# Altium footprint library SOMs.PcbLib: 40 footprints (part 3 of 3)
Each footprint in its own frame and in the unit in brackets; x right, y up, seen from the top. Pads: shape width x height; smd on the part's side, far side on the other; paste and mask are expansions set on the pad; w line width, h text height; cw(c..) or ccw(c..) is an arc to the next point about the centre after c.
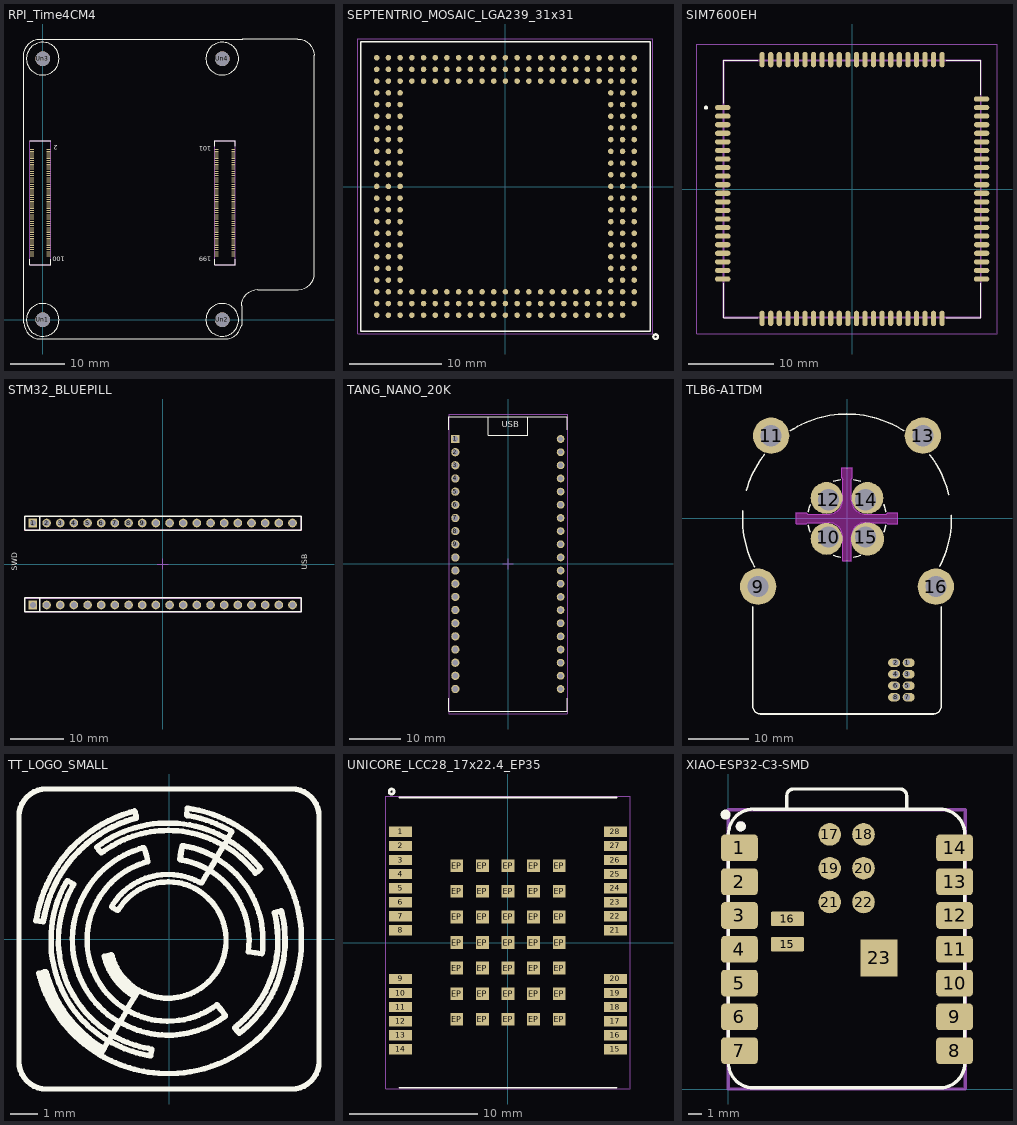
[diagram p2: the footprints below, top view; thin cyan lines are the x and y axes]

## RPI_Time4CM4 [mm] "2pcs. DF40HC(3.0)-100DS-0.4V"
pads (204):
  rect 0.7x0.2 smd: 1(-2,31.3) 2(1.08,31.3) 3(-2,30.9) 4(1.08,30.9) 5(-2,30.5) 6(1.08,30.5) 7(-2,30.1) 8(1.08,30.1) 9(-2,29.7) 10(1.08,29.7) 11(-2,29.3) 12(1.08,29.3) 13(-2,28.9) 14(1.08,28.9) 15(-2,28.5) 16(1.08,28.5) 17(-2,28.1) 18(1.08,28.1) 19(-2,27.7) 20(1.08,27.7) 21(-2,27.3) 22(1.08,27.3) 23(-2,26.9) 24(1.08,26.9) 25(-2,26.5) 26(1.08,26.5) 27(-2,26.1) 28(1.08,26.1) 29(-2,25.7) 30(1.08,25.7) 31(-2,25.3) 32(1.08,25.3) 33(-2,24.9) 34(1.08,24.9) 35(-2,24.5) 36(1.08,24.5) 37(-2,24.1) 38(1.08,24.1) 39(-2,23.7) 40(1.08,23.7) 41(-2,23.3) 42(1.08,23.3) 43(-2,22.9) 44(1.08,22.9) 45(-2,22.5) 46(1.08,22.5) 47(-2,22.1) 48(1.08,22.1) 49(-2,21.7) 50(1.08,21.7) 51(-2,21.3) 52(1.08,21.3) 53(-2,20.9) 54(1.08,20.9) 55(-2,20.5) 56(1.08,20.5) 57(-2,20.1) 58(1.08,20.1) 59(-2,19.7) 60(1.08,19.7) 61(-2,19.3) 62(1.08,19.3) 63(-2,18.9) 64(1.08,18.9) 65(-2,18.5) 66(1.08,18.5) 67(-2,18.1) 68(1.08,18.1) 69(-2,17.7) 70(1.08,17.7) 71(-2,17.3) 72(1.08,17.3) 73(-2,16.9) 74(1.08,16.9) 75(-2,16.5) 76(1.08,16.5) 77(-2,16.1) 78(1.08,16.1) 79(-2,15.7) 80(1.08,15.7) 81(-2,15.3) 82(1.08,15.3) 83(-2,14.9) 84(1.08,14.9) 85(-2,14.5) 86(1.08,14.5) 87(-2,14.1) 88(1.08,14.1) 89(-2,13.7) 90(1.08,13.7) 91(-2,13.3) 92(1.08,13.3) 93(-2,12.9) 94(1.08,12.9) 95(-2,12.5) 96(1.08,12.5) 97(-2,12.1) 98(1.08,12.1) 99(-2,11.7) 100(1.08,11.7) 101(31.92,31.3) 102(35,31.3) 103(31.92,30.9) 104(35,30.9) 105(31.92,30.5) 106(35,30.5) 107(31.92,30.1) 108(35,30.1) 109(31.92,29.7) 110(35,29.7) 111(31.92,29.3) 112(35,29.3) 113(31.92,28.9) 114(35,28.9) 115(31.92,28.5) 116(35,28.5) 117(31.92,28.1) 118(35,28.1) 119(31.92,27.7) 120(35,27.7) 121(31.92,27.3) 122(35,27.3) 123(31.92,26.9) 124(35,26.9) 125(31.92,26.5) 126(35,26.5) 127(31.92,26.1) 128(35,26.1) 129(31.92,25.7) 130(35,25.7) 131(31.92,25.3) 132(35,25.3) 133(31.92,24.9) 134(35,24.9) 135(31.92,24.5) 136(35,24.5) 137(31.92,24.1) 138(35,24.1) 139(31.92,23.7) 140(35,23.7) 141(31.92,23.3) 142(35,23.3) 143(31.92,22.9) 144(35,22.9) 145(31.92,22.5) 146(35,22.5) 147(31.92,22.1) 148(35,22.1) 149(31.92,21.7) 150(35,21.7) 151(31.92,21.3) 152(35,21.3) 153(31.92,20.9) 154(35,20.9) 155(31.92,20.5) 156(35,20.5) 157(31.92,20.1) 158(35,20.1) 159(31.92,19.7) 160(35,19.7) 161(31.92,19.3) 162(35,19.3) 163(31.92,18.9) 164(35,18.9) 165(31.92,18.5) 166(35,18.5) 167(31.92,18.1) 168(35,18.1) 169(31.92,17.7) 170(35,17.7) 171(31.92,17.3) 172(35,17.3) 173(31.92,16.9) 174(35,16.9) 175(31.92,16.5) 176(35,16.5) 177(31.92,16.1) 178(35,16.1) 179(31.92,15.7) 180(35,15.7) 181(31.92,15.3) 182(35,15.3) 183(31.92,14.9) 184(35,14.9) 185(31.92,14.5) 186(35,14.5) 187(31.92,14.1) 188(35,14.1) 189(31.92,13.7) 190(35,13.7) 191(31.92,13.3) 192(35,13.3) 193(31.92,12.9) 194(35,12.9) 195(31.92,12.5) 196(35,12.5) 197(31.92,12.1) 198(35,12.1) 199(31.92,11.7) 200(35,11.7)
  round 2.7 hole 2.7: Un1(0,0) Un2(33,0) Un3(0,48) Un4(33,48)
Top Overlay:
  circle w0.2: c0,48 r3
  circle w0.2: c33,48 r3
  circle w0.2: c0,0 r3
  circle w0.2: c33,0 r3
  lines w0.12: -2.35,11.1 -2.35,10.1 1.43,10.1 1.43,11.1 ; -2.35,32.9 1.43,32.9 ; 31.57,11.1 31.57,10.1 35.35,10.1 35.35,11.1 ; 31.57,31.9 31.57,32.9 35.35,32.9 35.35,31.9
  lines w0.2: -3.477,49.042 -3.246,49.801 -2.969,50.32 -2.596,50.774 -2.141,51.147 -1.623,51.425 -1.06,51.595 36.744,51.595 ; -3.475,49.042 -3.475,-0.525 -3.417,-1.111 -3.246,-1.673 -2.969,-2.192 -2.596,-2.647 -2.141,-3.02 -1.623,-3.297 -1.06,-3.468 -0.475,-3.525 33.525,-3.525 34.111,-3.468 34.673,-3.297 35.192,-3.02 35.647,-2.647 36.02,-2.192 36.394,-1.492 36.551,-0.975 36.549,2.577 ; 36.556,2.577 36.613,3.163 36.784,3.725 37.061,4.244 37.434,4.699 37.889,5.072 38.408,5.349 38.971,5.52 39.556,5.577 ; 36.703,51.618 46.827,51.618 ; 39.556,5.568 46.937,5.568 47.646,5.638 48.085,5.771 48.603,6.048 49.058,6.421 49.431,6.876 49.691,7.361 49.868,7.946 49.868,48.602 ; 46.886,51.602 47.471,51.545 48.034,51.374 48.553,51.097 49.007,50.723 49.38,50.269 49.657,49.75 49.828,49.187 49.886,48.602
  text "199" at 30.997,12 h1.5
  text "101" at 30.997,32.25 h1.5
  text "100" at 3.997,12 h1.5
  text "2" at 2.75,32.5 h1.5
Top Designator:
  lines w0.12: -2.35,10.1 1.43,10.1 1.43,32.9 -2.35,32.9 -2.35,10.1 ; 31.57,10.1 31.57,32.9 35.35,32.9 35.35,10.1 31.57,10.1
3D body "DF40HC(3.0)-100DS-0.4V.stp": height -0.38, standoff -3.28, extent 31.785,10.2 35.165,32.8
3D body "DF40HC(3.0)-100DS-0.4V.stp": height -0.38, standoff -3.28, extent -2.19,10.2 1.19,32.8
3D body "Time4CM4_Modular.step": height 7.87, standoff 2.01, extent -3.5,-3.643 49.86,51.5

## SEPTENTRIO_MOSAIC_LGA239_31x31 [mm] "Septentrio mosaic (mosaic-T/X5/H) LGA-239 31x31 mm, pitch 1.27, pad D0.6 NSMD, mask +0.075. Geometry per SparkFun GNSS mosaic-T (CC BY-SA 4.0), checked vs mosaic HW Manual v1.9."
height 4.17
pads (239):
  round 0.6 smd mask+0.075: A2(12.725,-13.945) A3(11.455,-13.945) A4(10.185,-13.945) A5(8.915,-13.945) A6(7.645,-13.945) A7(6.375,-13.945) A8(5.105,-13.945) A9(3.835,-13.945) A10(2.565,-13.945) A11(1.295,-13.945) A12(0.025,-13.945) A13(-1.245,-13.945) A14(-2.515,-13.945) A15(-3.785,-13.945) A16(-5.055,-13.945) A17(-6.325,-13.945) A18(-7.595,-13.945) A19(-8.865,-13.945) A20(-10.135,-13.945) A21(-11.405,-13.945) A22(-12.675,-13.945) A23(-13.945,-13.945) AA1(13.995,11.455) AA2(12.725,11.455) AA3(11.455,11.455) AA4(10.185,11.455) AA5(8.915,11.455) AA6(7.645,11.455) AA7(6.375,11.455) AA8(5.105,11.455) AA9(3.835,11.455) AA10(2.565,11.455) AA11(1.295,11.455) AA12(0.025,11.455) AA13(-1.245,11.455) AA14(-2.515,11.455) AA15(-3.785,11.455) AA16(-5.055,11.455) AA17(-6.325,11.455) AA18(-7.595,11.455) AA19(-8.865,11.455) AA20(-10.135,11.455) AA21(-11.405,11.455) AA22(-12.675,11.455) AA23(-13.945,11.455) AB1(13.995,12.725) AB2(12.725,12.725) AB3(11.455,12.725) AB4(10.185,12.725) AB5(8.915,12.725) AB6(7.645,12.725) AB7(6.375,12.725) AB8(5.105,12.725) AB9(3.835,12.725) AB10(2.565,12.725) AB11(1.295,12.725) AB12(0.025,12.725) AB13(-1.245,12.725) AB14(-2.515,12.725) AB15(-3.785,12.725) AB16(-5.055,12.725) AB17(-6.325,12.725) AB18(-7.595,12.725) AB19(-8.865,12.725) AB20(-10.135,12.725) AB21(-11.405,12.725) AB22(-12.675,12.725) AB23(-13.945,12.725) AC1(13.995,13.995) AC2(12.725,13.995) AC3(11.455,13.995) AC4(10.185,13.995) AC5(8.915,13.995) AC6(7.645,13.995) AC7(6.375,13.995) AC8(5.105,13.995) AC9(3.835,13.995) AC10(2.565,13.995) AC11(1.295,13.995) AC12(0.025,13.995) AC13(-1.245,13.995) AC14(-2.515,13.995) AC15(-3.785,13.995) AC16(-5.055,13.995) AC17(-6.325,13.995) AC18(-7.595,13.995) AC19(-8.865,13.995) AC20(-10.135,13.995) AC21(-11.405,13.995) AC22(-12.675,13.995) AC23(-13.945,13.995) B1(13.995,-12.675) B2(12.725,-12.675) B3(11.455,-12.675) B4(10.185,-12.675) B5(8.915,-12.675) B6(7.645,-12.675) B7(6.375,-12.675) B8(5.105,-12.675) B9(3.835,-12.675) B10(2.565,-12.675) B11(1.295,-12.675) B12(0.025,-12.675) B13(-1.245,-12.675) B14(-2.515,-12.675) B15(-3.785,-12.675) B16(-5.055,-12.675) B17(-6.325,-12.675) B18(-7.595,-12.675) B19(-8.865,-12.675) B20(-10.135,-12.675) B21(-11.405,-12.675) B22(-12.675,-12.675) B23(-13.945,-12.675) C1(13.995,-11.405) C2(12.725,-11.405) C3(11.455,-11.405) C4(10.185,-11.405) C5(8.915,-11.405) C6(7.645,-11.405) C7(6.375,-11.405) C8(5.105,-11.405) C9(3.835,-11.405) C10(2.565,-11.405) C11(1.295,-11.405) C12(0.025,-11.405) C13(-1.245,-11.405) C14(-2.515,-11.405) C15(-3.785,-11.405) C16(-5.055,-11.405) C17(-6.325,-11.405) C18(-7.595,-11.405) C19(-8.865,-11.405) C20(-10.135,-11.405) C21(-11.405,-11.405) C22(-12.675,-11.405) C23(-13.945,-11.405) D1(13.995,-10.135) D2(12.725,-10.135) D3(11.455,-10.135) D21(-11.405,-10.135) D22(-12.675,-10.135) D23(-13.945,-10.135) E1(13.995,-8.865) E2(12.725,-8.865) E3(11.455,-8.865) E21(-11.405,-8.865) E22(-12.675,-8.865) E23(-13.945,-8.865) F1(13.995,-7.595) F2(12.725,-7.595) F3(11.455,-7.595) F21(-11.405,-7.595) F22(-12.675,-7.595) F23(-13.945,-7.595) G1(13.995,-6.325) G2(12.725,-6.325) G3(11.455,-6.325) G21(-11.405,-6.325) G22(-12.675,-6.325) G23(-13.945,-6.325) H1(13.995,-5.055) H2(12.725,-5.055) H3(11.455,-5.055) H21(-11.405,-5.055) H22(-12.675,-5.055) H23(-13.945,-5.055) J1(13.995,-3.785) J2(12.725,-3.785) J3(11.455,-3.785) J21(-11.405,-3.785) J22(-12.675,-3.785) J23(-13.945,-3.785) K1(13.995,-2.515) K2(12.725,-2.515) K3(11.455,-2.515) K21(-11.405,-2.515) K22(-12.675,-2.515) K23(-13.945,-2.515) L1(13.995,-1.245) L2(12.725,-1.245) L3(11.455,-1.245) L21(-11.405,-1.245) L22(-12.675,-1.245) L23(-13.945,-1.245) M1(13.995,0.025) M2(12.725,0.025) M3(11.455,0.025) M21(-11.405,0.025) M22(-12.675,0.025) M23(-13.945,0.025) N1(13.995,1.295) N2(12.725,1.295) N3(11.455,1.295) N21(-11.405,1.295) N22(-12.675,1.295) N23(-13.945,1.295) P1(13.995,2.565) P2(12.725,2.565) P3(11.455,2.565) P21(-11.405,2.565) P22(-12.675,2.565) P23(-13.945,2.565) R1(13.995,3.835) R2(12.725,3.835) R3(11.455,3.835) R21(-11.405,3.835) R22(-12.675,3.835) R23(-13.945,3.835) T1(13.995,5.105) T2(12.725,5.105) T3(11.455,5.105) T21(-11.405,5.105) T22(-12.675,5.105) T23(-13.945,5.105) U1(13.995,6.375) U2(12.725,6.375) U3(11.455,6.375) U21(-11.405,6.375) U22(-12.675,6.375) U23(-13.945,6.375) V1(13.995,7.645) V2(12.725,7.645) V3(11.455,7.645) V21(-11.405,7.645) V22(-12.675,7.645) V23(-13.945,7.645) W1(13.995,8.915) W2(12.725,8.915) W3(11.455,8.915) W21(-11.405,8.915) W22(-12.675,8.915) W23(-13.945,8.915) Y1(13.995,10.185) Y2(12.725,10.185) Y3(11.455,10.185) Y21(-11.405,10.185) Y22(-12.675,10.185) Y23(-13.945,10.185)
Top Overlay:
  circle w0.25: c16.325,-16.275 r0.25
  lines w0.15: -15.675,-15.675 -15.675,15.725 15.725,15.725 15.725,-15.675 -15.675,-15.675
Mechanical 15:
  lines w0.05: -15.975,-15.975 -15.975,16.025 16.025,16.025 16.025,-15.975 -15.975,-15.975

## SIM7600EH [mm]
pads (87):
  rrect100% 1.8x0.6 smd: 1(-15.1,9.5) 2(-15.1,8.5) 3(-15.1,7.5) 4(-15.1,6.5) 5(-15.1,5.5) 6(-15.1,4.5) 7(-15.1,3.5) 8(-15.1,2.5) 9(-15.1,1.5) 10(-15.1,0.5) 11(-15.1,-0.5) 12(-15.1,-1.5) 13(-15.1,-2.5) 14(-15.1,-3.5) 15(-15.1,-4.5) 16(-15.1,-5.5) 17(-15.1,-6.5) 18(-15.1,-7.5) 19(-15.1,-8.5) 20(-15.1,-9.5) 41(15.1,-9.5) 42(15.1,-8.5) 43(15.1,-7.5) 44(15.1,-6.5) 45(15.1,-5.5) 46(15.1,-4.5) 47(15.1,-3.5) 48(15.1,-2.5) 49(15.1,-1.5) 50(15.1,-0.5) 51(15.1,0.5) 52(15.1,1.5) 53(15.1,2.5) 54(15.1,3.5) 55(15.1,4.5) 56(15.1,5.5) 57(15.1,6.5) 58(15.1,7.5) 59(15.1,8.5) 60(15.1,9.5) 81(-15.1,-10.5) 82(15.1,-10.5) 85(15.1,10.5)
  rrect100% 0.6x1.8 smd: 21(-9.5,-15.1) 22(-8.5,-15.1) 23(-7.5,-15.1) 24(-6.5,-15.1) 25(-5.5,-15.1) 26(-4.5,-15.1) 27(-3.5,-15.1) 28(-2.5,-15.1) 29(-1.5,-15.1) 30(-0.5,-15.1) 31(0.5,-15.1) 32(1.5,-15.1) 33(2.5,-15.1) 34(3.5,-15.1) 35(4.5,-15.1) 36(5.5,-15.1) 37(6.5,-15.1) 38(7.5,-15.1) 39(8.5,-15.1) 40(9.5,-15.1) 61(9.5,15.1) 62(8.5,15.1) 63(7.5,15.1) 64(6.5,15.1) 65(5.5,15.1) 66(4.5,15.1) 67(3.5,15.1) 68(2.5,15.1) 69(1.5,15.1) 70(0.5,15.1) 71(-0.5,15.1) 72(-1.5,15.1) 73(-2.5,15.1) 74(-3.5,15.1) 75(-4.5,15.1) 76(-5.5,15.1) 77(-6.5,15.1) 78(-7.5,15.1) 79(-8.5,15.1) 80(-9.5,15.1) 83(10.5,-15.1) 84(-10.5,-15.1) 86(-10.5,15.1) 87(10.5,15.1)
Top Overlay:
  lines w0.1: -15,-11 -15,-15 -11,-15 ; -15,10 -15,15 -11,15 ; 11,-15 15,-15 15,-11 ; 11,15 15,15 15,11
  lines w0.4: -17.1,9.5 ccw(c-17.05,9.5) -17,9.5 ccw(c-17.05,9.5) -17.1,9.5
Mechanical 13:
  lines w0.2: -15,-15 -15,15 15,15 15,-15 -15,-15
Mechanical 15:
  lines w0.1: -18.1,-16.9 -18.1,16.9 16.9,16.9 16.9,-16.9 -18.1,-16.9
3D body "SIM7600EH.stp": height 2.92, standoff 0.02, extent -15,-15 15,15

## STM32_BLUEPILL [mm]
pads (40):
  rect 1.6x1.6 hole 1.1: 1(-24.13,7.62) 40(-24.13,-7.62)
  round 1.6 hole 1.1: 2(-21.59,7.62) 3(-19.05,7.62) 4(-16.51,7.62) 5(-13.97,7.62) 6(-11.43,7.62) 7(-8.89,7.62) 8(-6.35,7.62) 9(-3.81,7.62) 10(-1.27,7.62) 11(1.27,7.62) 12(3.81,7.62) 13(6.35,7.62) 14(8.89,7.62) 15(11.43,7.62) 16(13.97,7.62) 17(16.51,7.62) 18(19.05,7.62) 19(21.59,7.62) 20(24.13,7.62) 21(24.13,-7.62) 22(21.59,-7.62) 23(19.05,-7.62) 24(16.51,-7.62) 25(13.97,-7.62) 26(11.43,-7.62) 27(8.89,-7.62) 28(6.35,-7.62) 29(3.81,-7.62) 30(1.27,-7.62) 31(-1.27,-7.62) 32(-3.81,-7.62) 33(-6.35,-7.62) 34(-8.89,-7.62) 35(-11.43,-7.62) 36(-13.97,-7.62) 37(-16.51,-7.62) 38(-19.05,-7.62) 39(-21.59,-7.62)
Top Overlay:
  lines w0.25: -22.86,-8.89 -22.86,-6.444 ; -22.86,6.35 -22.86,8.796 ; -25.68,-8.92 -25.68,-6.32 25.78,-6.32 25.78,-8.92 -25.68,-8.92 ; -25.68,6.32 -25.68,8.92 25.78,8.92 25.78,6.32 -25.68,6.32
  text "USB" at 27.257,-1.049 h1.8
  text "SWD" at -26.718,-1.258 h1.8
Mechanical 13:
  lines w0.1: -22.86,-8.89 -22.86,-6.35 ; -22.86,6.35 -22.86,8.89 ; 0,-6.35 -25.4,-6.35 -25.4,-6.32 0,-6.32 ; -25.4,8.89 0,8.89 0,8.92 -25.4,8.92 -25.4,8.89
Mechanical 15:
  lines w0.1: -1,0 1,0 ; 0,-1 0,1 ; -25.68,-8.89 25.78,-8.89 25.78,-6.35 -25.68,-6.35 -25.68,-8.89 ; -25.68,6.35 25.78,6.35 25.78,8.89 -25.68,8.89 -25.68,6.35
3D body "Blue Pill STM32.step": height 22, standoff 1.9, extent -31.115,-11.43 27.305,11.43
3D body "PBS-20.STEP": height 8.5, standoff -3.15, extent -25.4,-8.89 25.4,-6.35
3D body "PBS-20.STEP": height 8.5, standoff -3.15, extent -25.4,6.35 25.4,8.89

## TANG_NANO_20K [mm]
pads (40):
  rect 1.6x1.6 hole 1.1: 1(-10.16,24.13)
  round 1.6 hole 1.1: 2(-10.16,21.59) 3(-10.16,19.05) 4(-10.16,16.51) 5(-10.16,13.97) 6(-10.16,11.43) 7(-10.16,8.89) 8(-10.16,6.35) 9(-10.16,3.81) 10(-10.16,1.27) 11(-10.16,-1.27) 12(-10.16,-3.81) 13(-10.16,-6.35) 14(-10.16,-8.89) 15(-10.16,-11.43) 16(-10.16,-13.97) 17(-10.16,-16.51) 18(-10.16,-19.05) 19(-10.16,-21.59) 20(-10.16,-24.13)
  round 1.5 hole 1: 21(10.16,-24.13) 22(10.16,-21.59) 23(10.16,-19.05) 24(10.16,-16.51) 25(10.16,-13.97) 26(10.16,-11.43) 27(10.16,-8.89) 28(10.16,-6.35) 29(10.16,-3.81) 30(10.16,-1.27) 31(10.16,1.27) 32(10.16,3.81) 33(10.16,6.35) 34(10.16,8.89) 35(10.16,11.43) 36(10.16,13.97) 37(10.16,16.51) 38(10.16,19.05) 39(10.16,21.59) 40(10.16,24.13)
Top Overlay:
  lines w0.2: -11.43,-25.908 -11.43,-28.448 11.43,-28.448 11.43,-25.908 ; -11.43,25.908 -11.43,28.448 11.43,28.448 11.43,25.908 ; -3.81,28.448 -3.81,24.892 3.81,24.892 3.81,28.448
  text "USB" at -1.18,26.013 h2
Top Assembly:
  lines w0.1: -11.43,-28.956 -11.43,28.956 11.43,28.956 11.43,-28.956 -11.43,-28.956
Mechanical 15:
  lines w0.1: -1,0 1,0 ; 0,-1 0,1
3D body "Tang_Nano_20K_3921.step": height 19.17, standoff 2.41, extent -11.43,-29.518 11.43,28.502
3D body "User Library-PBS_(DS1023)_1line_connectors_h=5_0_8_5mm_step_2_54mm-1.step": height 8.5, standoff -3, extent -11.43,-10.406 -8.93,25.654
3D body "User Library-PBS_(DS1023)_1line_connectors_h=5_0_8_5mm_step_2_54mm-1.step": height 8.5, standoff -3, extent 8.93,-25.4 11.43,10.66

## TLB6-A1TDM [mm]
pads (16):
  oval 2x1.4 hole 1 copper offset 0.25,0 mask+0: 1(9.937,-23.829) 3(9.937,-25.729) 5(9.937,-27.629) 7(9.937,-29.529)
  oval 2x1.4 hole 1 copper offset -0.25,0 mask+0: 2(8.037,-23.829) 4(8.037,-25.729) 6(8.037,-27.629) 8(8.037,-29.529)
  round 6 hole 3.5 mask+0: 9(-14.68,-11.259) 11(-12.53,13.67) 13(12.53,13.67) 16(14.679,-11.259)
  round 5.25 hole 3.5 copper offset -0.3,-0.3 mask+0: 10(-3.08,-3.08)
  round 5.25 hole 3.5 copper offset -0.3,0.3 mask+0: 12(-3.08,3.08)
  round 5.25 hole 3.5 copper offset 0.3,0.3 mask+0: 14(3.08,3.08)
  round 5.5 hole 3.5 copper offset 0.3,-0.3 mask+0: 15(3.08,-3.08)
Top Overlay:
  lines w0.254: -17.201,1.301 ccw(c0,0) -15.279,-8.006 ; -16.615,4.638 cw(c0,0) -13.638,10.564 ; -15.55,-14.562 -15.55,-31.05 ccw(c-14.3,-31.05) -14.3,-32.3 14.3,-32.3 ccw(c14.3,-31.05) 15.55,-31.05 15.55,-14.562 ; -9.394,14.468 cw(c0,0) 9.378,14.479 ; -6.4,-1.134 ccw(c0,0) -6.108,-2.223 ; -6.4,1.134 cw(c0,0) -6.108,2.223 ; -2.223,-6.108 ccw(c0,0) -1.129,-6.401 ; -2.223,6.108 cw(c0,0) -1.134,6.4 ; 1.129,-6.401 ccw(c0,0) 2.223,-6.108 ; 1.134,6.4 cw(c0,0) 2.223,6.108 ; 6.108,-2.223 ccw(c0,0) 6.4,-1.134 ; 6.108,2.223 cw(c0,0) 6.4,1.134 ; 13.69,10.495 cw(c0,0) 16.803,3.901 ; 15.354,-7.863 ccw(c0,0) 17.241,0.565
Keep-Out Layer:
  board cut-out: -6.5,-0.7 -3.1,-0.7 -2.865,-0.712 -2.403,-0.803 -1.969,-0.983 -1.577,-1.245 -1.245,-1.577 -0.983,-1.969 -0.803,-2.403 -0.712,-2.865 -0.7,-3.1 -0.7,-6.5 0.7,-6.5 0.7,-3.1 0.712,-2.865 0.803,-2.403 0.983,-1.969 1.245,-1.577 1.577,-1.245 1.969,-0.983 2.403,-0.803 2.865,-0.712 3.1,-0.7 6.5,-0.7 6.5,0.7 3.1,0.7 2.865,0.712 2.403,0.803 1.969,0.983 1.577,1.245 1.245,1.577 0.983,1.969 0.803,2.403 0.712,2.865 0.7,3.1 0.7,6.5 -0.7,6.5 -0.7,3.1 -0.712,2.865 -0.803,2.403 -0.983,1.969 -1.245,1.577 -1.577,1.245 -1.969,0.983 -2.403,0.803 -2.865,0.712 -3.1,0.7 -6.5,0.7
  board cut-out: -8.4,-0.9 -6.7,-0.9 -6.5,-0.7 -3.1,-0.7 -2.865,-0.712 -2.403,-0.803 -1.969,-0.983 -1.577,-1.245 -1.245,-1.577 -0.983,-1.969 -0.803,-2.403 -0.712,-2.865 -0.7,-3.1 -0.7,-7 0.7,-7 0.7,-3.1 0.712,-2.865 0.803,-2.403 0.983,-1.969 1.245,-1.577 1.577,-1.245 1.969,-0.983 2.403,-0.803 2.865,-0.712 3.1,-0.7 6.5,-0.7 6.7,-0.9 8.4,-0.9 8.4,0.9 6.7,0.9 6.5,0.7 3.1,0.7 2.865,0.712 2.403,0.803 1.969,0.983 1.577,1.245 1.245,1.577 0.983,1.969 0.803,2.403 0.712,2.865 0.7,3.1 0.7,6.5 0.9,6.7 0.9,8.4 -0.9,8.4 -0.9,6.7 -0.7,6.5 -0.7,3.1 -0.712,2.865 -0.803,2.403 -0.983,1.969 -1.245,1.577 -1.577,1.245 -1.969,0.983 -2.403,0.803 -2.865,0.712 -3.1,0.7 -6.5,0.7 -6.7,0.9 -8.4,0.9
Keep-Out Layer:
  lines w0.1: -8.4,-0.9 -6.7,-0.9 -6.5,-0.7 -3.1,-0.7 cw(c-3.1,-3.1) -0.7,-3.1 -0.7,-7 0.7,-7 0.7,-3.1 cw(c3.1,-3.1) 3.1,-0.7 6.5,-0.7 6.7,-0.9 8.4,-0.9 8.4,0.9 6.7,0.9 6.5,0.7 3.1,0.7 cw(c3.1,3.1) 0.7,3.1 0.7,6.5 0.9,6.7 0.9,8.4 -0.9,8.4 -0.9,6.7 -0.7,6.5 -0.7,3.1 cw(c-3.1,3.1) -3.1,0.7 -6.5,0.7 -6.7,0.9 -8.4,0.9 -8.4,-0.9
Bottom Assembly:
  circle w0.127: c9.939,-29.54 r0.35
  circle w0.127: c9.939,-27.64 r0.35
  circle w0.127: c9.938,-27.628 r0.25
  circle w0.127: c9.939,-29.528 r0.25
  circle w0.127: c9.938,-27.628 r0.05
  circle w0.127: c9.939,-29.528 r0.05
  circle w0.127: c9.939,-25.74 r0.35
  circle w0.127: c9.939,-23.84 r0.35
  circle w0.127: c9.935,-23.828 r0.25
  circle w0.127: c9.936,-25.728 r0.25
  circle w0.127: c9.935,-23.828 r0.05
  circle w0.127: c9.936,-25.728 r0.05
  circle w0.127: c8.039,-29.54 r0.35
  circle w0.127: c8.039,-27.64 r0.35
  circle w0.127: c8.038,-27.63 r0.25
  circle w0.127: c8.039,-29.53 r0.25
  circle w0.127: c8.038,-27.63 r0.05
  circle w0.127: c8.039,-29.53 r0.05
  circle w0.127: c8.039,-25.74 r0.35
  circle w0.127: c8.039,-23.84 r0.35
  circle w0.127: c8.036,-25.729 r0.25
  circle w0.127: c8.035,-23.829 r0.25
  circle w0.127: c8.036,-25.729 r0.05
  circle w0.127: c8.035,-23.829 r0.05
  lines w0.127: -15.55,-13.678 cw(c-14.68,-11.26) -14.896,-8.699 ; -13.142,11.174 cw(c-12.53,13.67) -9.99,14.063 ; 9.99,14.063 cw(c12.53,13.67) 13.142,11.174 ; 14.896,-8.699 cw(c14.68,-11.26) 15.55,-13.678
Dimensions:
  lines w0.1: -8.4,-0.9 -6.7,-0.9 -6.5,-0.7 -3.1,-0.7 cw(c-3.1,-3.1) -0.7,-3.1 -0.7,-7 0.7,-7 0.7,-3.1 cw(c3.1,-3.1) 3.1,-0.7 6.5,-0.7 6.7,-0.9 8.4,-0.9 8.4,0.9 6.7,0.9 6.5,0.7 3.1,0.7 cw(c3.1,3.1) 0.7,3.1 0.7,6.5 0.9,6.7 0.9,8.4 -0.9,8.4 -0.9,6.7 -0.7,6.5 -0.7,3.1 cw(c-3.1,3.1) -3.1,0.7 -6.5,0.7 -6.7,0.9 -8.4,0.9 -8.4,-0.9
3D body "TLB6-A1TDM.stp": height 17.25, standoff -5.75, extent -17,-32.05 17,17

## TT_LOGO_SMALL [mm]
Top Overlay:
  drawing of 1108 lines, arcs and shapes, not listed

## UNICORE_LCC28_17x22.4_EP35 [mm] "Unicore LCC-28 17x22.4 mm + 35 GND/thermal pads 1x1 mm pitch 2 mm (UT986). Per UT986 User Manual R2.4 Fig.4-4."
height 2.4
pads (63):
  rect 1.8x0.8 smd: 1(-8.375,8.675) 2(-8.375,7.575) 3(-8.375,6.475) 4(-8.375,5.375) 5(-8.375,4.275) 6(-8.375,3.175) 7(-8.375,2.075) 8(-8.375,0.975) 9(-8.375,-2.825) 10(-8.375,-3.925) 11(-8.375,-5.025) 12(-8.375,-6.125) 13(-8.375,-7.225) 14(-8.375,-8.325) 15(8.425,-8.325) 16(8.425,-7.225) 17(8.425,-6.125) 18(8.425,-5.025) 19(8.425,-3.925) 20(8.425,-2.825) 21(8.425,0.975) 22(8.425,2.075) 23(8.425,3.175) 24(8.425,4.275) 25(8.425,5.375) 26(8.425,6.475) 27(8.425,7.575) 28(8.425,8.675)
  rect 1x1 smd: EP(-3.975,-5.975) EP(-3.975,-3.975) EP(-3.975,-1.975) EP(-3.975,0.025) EP(-3.975,2.025) EP(-3.975,4.025) EP(-3.975,6.025) EP(-1.975,-5.975) EP(-1.975,-3.975) EP(-1.975,-1.975) EP(-1.975,0.025) EP(-1.975,2.025) EP(-1.975,4.025) EP(-1.975,6.025) EP(0.025,-5.975) EP(0.025,-3.975) EP(0.025,-1.975) EP(0.025,0.025) EP(0.025,2.025) EP(0.025,4.025) EP(0.025,6.025) EP(2.025,-5.975) EP(2.025,-3.975) EP(2.025,-1.975) EP(2.025,0.025) EP(2.025,2.025) EP(2.025,4.025) EP(2.025,6.025) EP(4.025,-5.975) EP(4.025,-3.975) EP(4.025,-1.975) EP(4.025,0.025) EP(4.025,2.025) EP(4.025,4.025) EP(4.025,6.025)
Top Overlay:
  circle w0.2: c-9.075,11.825 r0.2
  lines w0.15: -8.475,-11.325 8.525,-11.325 ; -8.475,11.375 8.525,11.375
Mechanical 15:
  lines w0.05: -9.525,-11.425 9.575,-11.425 9.575,11.475 -9.525,11.475 -9.525,-11.425

## XIAO-ESP32-C3-SMD [mm]
pads (23):
  rrect25% 2.75x2 smd: 1(0.835,18.12) 2(0.835,15.58) 3(0.835,13.04) 4(0.835,10.5) 5(0.835,7.96) 6(0.835,5.42) 7(0.835,2.88) 8(17,2.88) 9(17,5.42) 10(17,7.96) 11(17,10.5) 12(17,13.04) 13(17,15.58) 14(17,18.12)
  rrect25% 2.5x1.1 smd: 15(4.445,10.882) 16(4.445,12.787)
  round 1.7 smd: 17(7.62,19.132) 18(10.16,19.132) 19(7.62,16.592) 20(10.16,16.592) 21(7.62,14.052) 22(10.16,14.052)
  rect 2.8x2.8 smd: 23(11.325,9.85)
Top Overlay:
  circle w0.254: c-0.21,20.621 r0.254
  circle w0.254: c0.933,19.741 r0.254
  region: -0.111,20.86 -0.027,20.804 0.029,20.72 0.049,20.621 0.029,20.522 -0.027,20.438 -0.111,20.382 -0.21,20.362 -0.309,20.382 -0.393,20.438 -0.449,20.522 -0.469,20.621 -0.449,20.72 -0.393,20.804 -0.309,20.86 -0.21,20.88
  region: 1.032,19.98 1.116,19.924 1.172,19.84 1.192,19.741 1.172,19.642 1.116,19.558 1.032,19.502 0.933,19.482 0.834,19.502 0.75,19.558 0.694,19.642 0.674,19.741 0.694,19.84 0.75,19.924 0.834,19.98 0.933,20
  lines w0.254: 0,19.132 0,1.987 ccw(c1.905,1.987) 1.905,0.082 15.875,0.082 ccw(c15.875,1.987) 17.78,1.987 17.78,19.132 ccw(c15.875,19.132) 15.875,21.037 1.905,21.037 ; 0,19.136 cw(c1.905,19.136) 1.905,21.041 ; 4.395,21.037 4.399,22.047 cw(c4.899,22.047) 4.899,22.547 12.894,22.547 cw(c12.894,22.047) 13.394,22.047 13.394,21.037
Top Designator:
  lines w0.254: 0,0 0,21 17.8,21 17.8,0 0,0
Mechanical 6:
  circle w0.254: c0.936,19.747 r0.254
  region: 1.035,19.986 1.119,19.93 1.175,19.846 1.195,19.747 1.175,19.648 1.119,19.564 1.035,19.508 0.936,19.488 0.837,19.508 0.753,19.564 0.697,19.648 0.677,19.747 0.697,19.846 0.753,19.93 0.837,19.986 0.936,20.006
  lines w0.254: 0,0 0,21 17.8,21 17.8,0 0,0
3D body "Seeed Studio XIAO-ESP32-C3.step": height 4.21, standoff 0, extent 0,0 17.78,22.463